# Altium footprint library Footprint_Vlad.PcbLib: 392 footprints (part 18 of 25)
Each footprint in its own frame and in the unit in brackets; x right, y up, seen from the top. Pads: shape width x height; smd on the part's side, far side on the other; paste and mask are expansions set on the pad; w line width, h text height; cw(c..) or ccw(c..) is an arc to the next point about the centre after c.
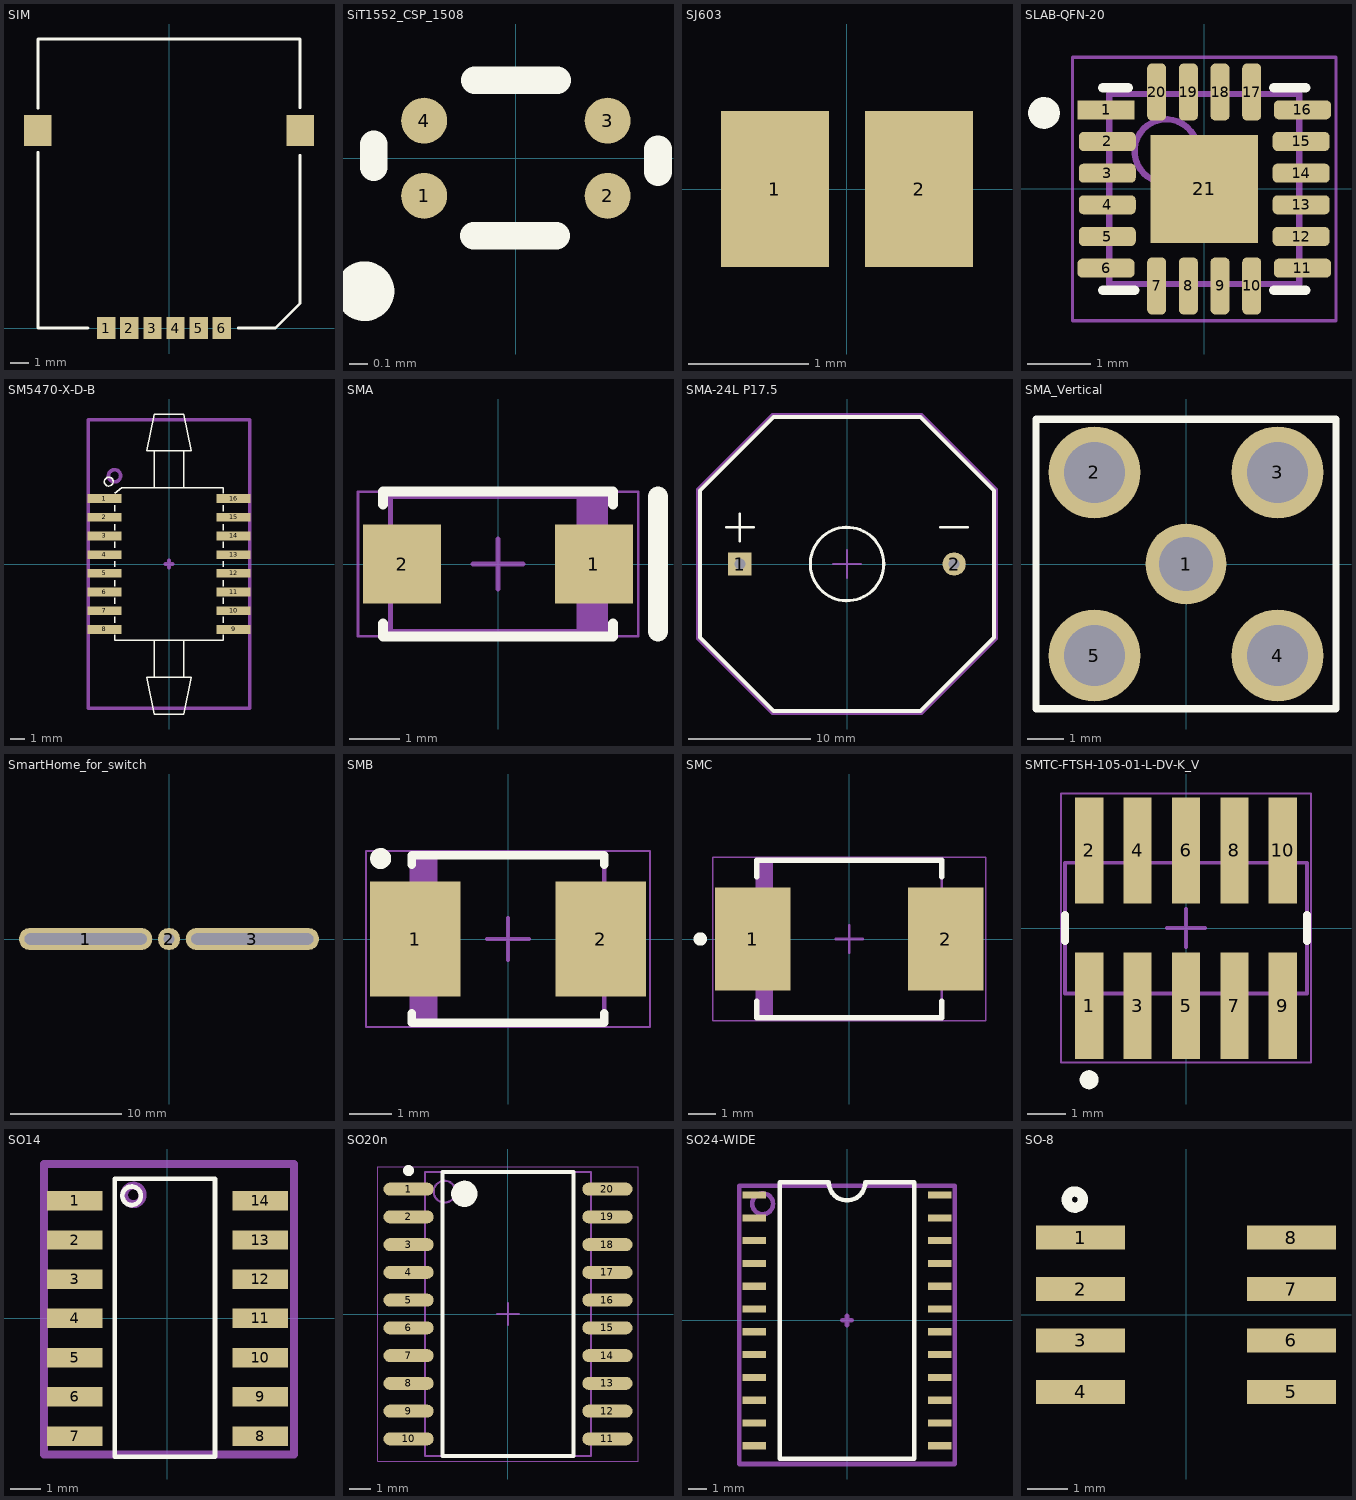
[diagram p17: the footprints below, top view; thin cyan lines are the x and y axes]

## SIM [mm]
pads (8):
  rect 1x1.2 smd: 1(-3.45,0) 2(-2.18,0) 3(-0.91,0) 4(0.36,0) 5(1.63,0) 6(2.9,0)
  rect 1.5x1.7 smd: ""(-7.2,10.85) ""(7.2,10.85)
Top Overlay:
  lines w0.15: -7.2,9.652 -7.2,0 -4.445,0 ; -7.2,12.065 -7.2,15.875 7.2,15.875 7.2,12.104 ; 3.81,0 5.842,0 7.2,1.358 7.2,9.486
3D body: height 2, standoff 0, extent -7.239,0 7.493,16.129

## SiT1552_CSP_1508 [mm]
pads (4):
  round 0.25 smd mask+0.05: 1(-0.5,-0.205) 2(0.5,-0.205) 3(0.5,0.205) 4(-0.5,0.205)
Top Overlay:
  circle w0.254: c-0.825,-0.725 r0.035
  lines w0.15: -0.775,-0.05 -0.775,0.075 ; -0.23,-0.422 0.22,-0.422 ; -0.225,0.425 0.225,0.425 ; 0.775,-0.075 0.775,0.05
3D body "CSP_1508_4pins.stp": height 0.5, standoff -0.07, extent -0.77,-0.42 0.77,0.42

## SJ603 [mm]
pads (2):
  rect 0.9x1.3 smd: 1(-0.6,0) 2(0.6,0)

## SLAB-QFN-20 [mm] "QFN, 20-Leads, Body 3x3mm, Pitch 0.5mm, Thermal Pad 1.7x1.7mm"
height 0.9
pads (21):
  rect 0.9x0.3 smd: 1(-1.55,1.25)
  rrect50% 0.9x0.3 smd: 2(-1.53,0.75) 3(-1.53,0.25) 4(-1.53,-0.25) 5(-1.53,-0.75) 6(-1.55,-1.25) 11(1.55,-1.25) 12(1.53,-0.75) 13(1.53,-0.25) 14(1.53,0.25) 15(1.53,0.75) 16(1.55,1.25)
  rrect50% 0.3x0.9 smd: 7(-0.75,-1.53) 8(-0.25,-1.53) 9(0.25,-1.53) 10(0.75,-1.53) 17(0.75,1.53) 18(0.25,1.53) 19(-0.25,1.53) 20(-0.75,1.53)
  rect 1.7x1.7 smd: 21(0,0)
Top Overlay:
  circle w0.25: c-2.53,1.2 r0.125
  lines w0.15: -1.6,-1.6 -1.1,-1.6 ; -1.6,1.6 -1.2,1.6 ; 1.1,-1.6 1.6,-1.6 ; 1.1,1.6 1.6,1.6
Mechanical 13:
  circle w0.1: c-0.6,0.6 r0.5
  lines w0.1: -1.5,-1.5 -1.5,1.5 1.5,1.5 1.5,-1.5 -1.5,-1.5
Mechanical 15:
  lines w0.05: -2.08,-2.08 -2.08,2.08 2.08,2.08 2.08,-2.08 -2.08,-2.08
  lines w0.1: -0.5,0 0.5,0 ; 0,-0.5 0,0.5
3D body: height 0.9, standoff 0, extent -1.5,-1.5 1.5,1.5

## SM5470-X-D-B [mm]
pads (16):
  rect 2.3x0.6 smd: 1(-4.388,4.445) 2(-4.388,3.175) 3(-4.388,1.905) 4(-4.388,0.635) 5(-4.388,-0.635) 6(-4.388,-1.905) 7(-4.388,-3.175) 8(-4.388,-4.445) 9(4.388,-4.445) 10(4.388,-3.175) 11(4.388,-1.905) 12(4.388,-0.635) 13(4.388,0.635) 14(4.388,1.905) 15(4.388,3.175) 16(4.388,4.445)
Top Overlay:
  circle w0.1: c-4.1,5.6 r0.3
  lines w0.1: -3.7,-4.8 -3.7,-5.2 3.7,-5.2 3.7,-4.8 ; -3.7,-4 -3.7,-3.6 ; -3.7,-2.7 -3.7,-2.3 ; -3.7,-1.5 -3.7,-1.1 ; -3.7,-0.2 -3.7,0.2 ; -3.7,1.1 -3.7,1.5 ; -3.7,2.3 -3.7,2.7 ; -3.7,3.6 -3.7,4 ; -3.7,4.8 -3.2,5.2 3.7,5.2 3.7,4.8 ; -1,-7.7 -1,-5.2 ; -1,5.2 -1,7.7 ; 1,-7.7 1,-5.2 ; 1,5.2 1,7.7 ; 3.7,-4 3.7,-3.6 ; 3.7,-2.7 3.7,-2.3 ; 3.7,-1.5 3.7,-1.1 ; 3.7,-0.2 3.7,0.2 ; 3.7,1.1 3.7,1.5 ; 3.7,2.3 3.7,2.7 ; 3.7,3.6 3.7,4 ; -1.5,-7.7 1.5,-7.7 1,-10.2 -1,-10.2 -1.5,-7.7 ; -1.5,7.7 -1,10.2 1,10.2 1.5,7.7 -1.5,7.7
Mechanical 15:
  circle w0.254: c-3.7,6 r0.412
  lines w0.254: -0.254,0 0.254,0 ; 0,-0.254 0,0.254 ; -5.5,-9.8 5.5,-9.8 5.5,9.8 -5.5,9.8 -5.5,-9.8
  text "0,0" at 0.254,0 h1.52
  text ".Designator" at -2.9,10.7 h1.52
3D body "SM5470-001-D-B.STEP": height 5.54, standoff -0.13, extent -5.138,-9.805 5.162,9.795

## SMA [mm] "Molded Diode, 2-Leads, Body 4.292x2.693mm"
height 2.44
pads (2):
  rect 1.555x1.57 smd: 1(1.915,0) 2(-1.915,0)
Top Overlay:
  lines w0.2: -2.298,-1.185 -2.298,-1.448 2.298,-1.448 2.298,-1.185 ; -2.298,1.185 -2.298,1.448 2.298,1.448 2.298,1.185
  lines w0.4: 3.193,-1.346 3.193,1.346
Mechanical 13:
  region: 2.146,1.346 1.569,1.346 1.569,-1.346 2.146,-1.346
  lines w0.1: -2.146,-1.346 2.146,-1.346 2.146,1.346 -2.146,1.346 -2.146,-1.346
Mechanical 15:
  lines w0.05: -2.795,-1.446 2.795,-1.446 2.795,1.446 -2.795,1.446 -2.795,-1.446
  lines w0.1: -0.5,0 0.5,0 ; 0,-0.5 0,0.5
3D body: height 2.44, standoff 0, extent -2.146,-1.346 2.146,1.346

## SMA-24L P17.5 [mm]
pads (2):
  rect 1.9x1.9 hole 0.9: 1(-8.75,0)
  round 1.9 hole 0.9: 2(8.75,0)
Top Overlay:
  circle w0.254: c0,0 r3
  lines w0.2: -9.875,3 -7.625,3 ; -8.75,1.875 -8.75,4.125 ; 7.625,3 9.875,3
  lines w0.3: -12,-6 -12,6 -6,12 6,12 12,6 12,-6 6,-12 -6,-12 -12,-6
Courtyard Top:
  lines w0.2: -12.25,-6.1 -6.1,-12.25 6.1,-12.25 12.25,-6.1 12.25,6.1 6.1,12.25 -6.1,12.25 -12.25,6.1 -12.25,-6.1
Top Component Center:
  lines w0.2: -1.125,0 1.125,0 ; 0,-1.125 0,1.125
3D body "Sonitron-SMA(T)-24 P17_5.STEP": height 15.51, standoff -5.5, extent -12,-12 12,12

## SMA_Vertical [mm] "SMA PCB THT Jack"
height 10.46
pads (5):
  round 2.25 hole 1.5: 1(0,0)
  round 2.55 hole 1.7: 2(-2.54,2.54) 3(2.54,2.54) 4(2.54,-2.54) 5(-2.54,-2.54)
Top Overlay:
  lines w0.2: -4.16,-4.015 -4.16,4.015 4.16,4.015 4.16,-4.015 -4.16,-4.015
Assembly Top:
  lines w0.1: -4.16,-4.015 4.16,-4.015 4.16,4.015 -4.16,4.015 -4.16,-4.015
Courtyard Top:
  lines w0.05: -0.5,0 0.5,0 ; 0,-0.5 0,0.5 ; -4.16,-4.015 -4.16,4.015 4.16,4.015 4.16,-4.015 -4.16,-4.015
3D body "5-1814832-1.stp": height 9.5, standoff -4, extent -3.2,-3.2 3.2,3.2

## SmartHome_for_switch [mm]
pads (3):
  oval 12x2 hole 1 slot 11 at 0 deg: 1(-7.5,0) 3(7.5,0)
  round 2 hole 1: 2(0,0)

## SMB [mm] "Molded Diode, 2-Leads, Body 4.292x2.693mm"
height 2.44
pads (2):
  rect 2.159x2.743 smd: 1(-2.21,0) 2(2.21,0)
Top Overlay:
  circle w0.25: c-3.04,1.921 r0.125
  lines w0.2: -2.3,-1.772 -2.3,-2 2.3,-2 2.3,-1.772 ; -2.3,1.772 -2.3,2 2.3,2 2.3,1.772
Mechanical 13:
  rectangle: -2.3,-1.975 -1.681,1.975
  lines w0.1: -2.3,-1.975 -2.3,1.975 2.3,1.975 2.3,-1.975 -2.3,-1.975
Mechanical 15:
  lines w0.05: -3.39,-2.1 -3.39,2.1 3.39,2.1 3.39,-2.1 -3.39,-2.1
  lines w0.1: -0.5,0 0.5,0 ; 0,-0.5 0,0.5
3D body: height 2.42, standoff 0, extent -2.3,-1.975 2.3,1.975

## SMC [mil] "Molded, 2-Leads, Body 6.86x5.84mm"
height 99.02
pads (2):
  rect 110x150 smd: 1(-140.49,0) 2(140.49,0)
Top Overlay:
  circle w9.84: c-217.15,0 r4.92
  lines w7.87: -135.04,-90.75 -135.04,-114.96 135.04,-114.96 135.04,-90.75 ; -135.04,90.75 -135.04,114.96 135.04,114.96 135.04,90.75
Mechanical 13:
  rectangle: -135.45,-114.96 -111.25,114.96
  lines w3.94: -135.04,-114.96 -135.04,114.96 135.04,114.96 135.04,-114.96 -135.04,-114.96
Mechanical 15:
  lines w1.97: -199.43,-118.9 -199.43,118.9 199.43,118.9 199.43,-118.9 -199.43,-118.9
  lines w3.94: -19.68,0 19.69,0 ; 0,-19.68 0,19.68
3D body: height 99.02, standoff 1.97, extent -135.04,-114.96 135.04,114.96

## SMTC-FTSH-105-01-L-DV-K_V [mm] "CONN, 10-Leads, Body 6.35x3.43mm, Pitch 1.27mm"
height 6.25
pads (10):
  rect 0.74x2.79 smd: 1(-2.54,-2.035) 2(-2.54,2.035) 3(-1.27,-2.035) 4(-1.27,2.035) 5(0,-2.035) 6(0,2.035) 7(1.27,-2.035) 8(1.27,2.035) 9(2.54,-2.035) 10(2.54,2.035)
Top Overlay:
  circle w0.25: c-2.54,-3.98 r0.125
  lines w0.2: -3.175,-0.341 -3.175,0.341 ; 3.175,-0.341 3.175,0.341
Mechanical 13:
  lines w0.1: -3.175,-1.715 -3.175,1.715 3.175,1.715 3.175,-1.715 -3.175,-1.715
Mechanical 15:
  lines w0.05: -3.275,-3.53 -3.275,3.53 3.275,3.53 3.275,-3.53 -3.275,-3.53
  lines w0.1: -0.5,0 0.5,0 ; 0,-0.5 0,0.5
3D body "FTSH-105-01-L-DV-K.stp": height 6.12, standoff 0, extent -3.175,-2.921 3.175,2.921

## SO14 [mm]
pads (14):
  rect 1.8x0.63 smd: 1(-3,3.81) 2(-3,2.54) 3(-3,1.27) 4(-3,0) 5(-3,-1.27) 6(-3,-2.54) 7(-3,-3.81) 8(3,-3.81) 9(3,-2.54) 10(3,-1.27) 11(3,0) 12(3,1.27) 13(3,2.54) 14(3,3.81)
Top Overlay:
  circle w0.15: c-1.16,3.97 r0.3
  lines w0.15: -1.71,-4.48 1.54,-4.48 1.54,4.52 -1.71,4.52 -1.71,-4.48
Mechanical 15:
  circle w0.254: c-1.1,4 r0.3
  lines w0.254: -4,-4.4 -4,5 4.1,5 4.1,-4.4 -4,-4.4 ; -4,-4.4 -4,-4.4
  text ".Designator" at -3.2,5.5 h1.52

## SO20n [mm] "SOIC, 20-Leads, Body 12.8x7.5mm, Pitch 1.27mm, IPC Medium Density"
height 2.65
pads (20):
  oval 2.3x0.6 smd: 1(-4.55,5.715) 2(-4.55,4.445) 3(-4.55,3.175) 4(-4.55,1.905) 5(-4.55,0.635) 6(-4.55,-0.635) 7(-4.55,-1.905) 8(-4.55,-3.175) 9(-4.55,-4.445) 10(-4.55,-5.715) 11(4.55,-5.715) 12(4.55,-4.445) 13(4.55,-3.175) 14(4.55,-1.905) 15(4.55,-0.635) 16(4.55,0.635) 17(4.55,1.905) 18(4.55,3.175) 19(4.55,4.445) 20(4.55,5.715)
Top Overlay:
  circle w0.6: c-2,5.5 r0.3
  circle w0.25: c-4.55,6.565 r0.125
  lines w0.2: -3,-6.5 3,-6.5 3,6.5 -3,6.5 -3,-6.5
Mechanical 13:
  circle w0.1: c-2.9,5.6 r0.5
  lines w0.1: -3.8,-6.5 3.8,-6.5 3.8,6.5 -3.8,6.5 -3.8,-6.5
Mechanical 15:
  lines w0.05: -5.95,-6.75 5.95,-6.75 5.95,6.75 -5.95,6.75 -5.95,-6.75
  lines w0.1: -0.5,0 0.5,0 ; 0,-0.5 0,0.5
3D body: height 2.65, standoff 0.1, extent -3.8,-6.5 3.8,6.5

## SO24-WIDE [mm]
pads (24):
  rect 1.3x0.4 smd: 1(-5.162,6.985) 2(-5.162,5.715) 3(-5.162,4.445) 4(-5.162,3.175) 5(-5.162,1.905) 6(-5.162,0.635) 7(-5.162,-0.635) 8(-5.162,-1.905) 9(-5.162,-3.175) 10(-5.162,-4.445) 11(-5.162,-5.715) 12(-5.162,-6.985) 13(5.163,-6.985) 14(5.163,-5.715) 15(5.163,-4.445) 16(5.163,-3.175) 17(5.163,-1.905) 18(5.163,-0.635) 19(5.163,0.635) 20(5.163,1.905) 21(5.163,3.175) 22(5.163,4.445) 23(5.163,5.715) 24(5.163,6.985)
Top Overlay:
  lines w0.254: -3.75,-7.7 3.75,-7.7 3.75,7.7 1.016,7.7 cw(c0,7.7) -1.016,7.7 -3.75,7.7 -3.75,-7.7
Mechanical 15:
  circle w0.254: c-4.7,6.5 r0.583
  lines w0.254: -0.254,0 0.254,0 ; 0,-0.254 0,0.254 ; -6,-8 6,-8 6,7.5 -6,7.5 -6,-8
  text ".Designator" at -2.9,8.3 h1.52
3D body "User Library-SO-24W.STEP": height 2.48, standoff 0, extent -5.117,-7.72 5.193,7.69

## SO-8 [mm]
pads (8):
  rect 2.2x0.6 smd: 1(-2.6,1.905) 2(-2.6,0.635) 3(-2.6,-0.635) 4(-2.6,-1.905) 5(2.6,-1.905) 6(2.6,-0.635) 7(2.6,0.635) 8(2.6,1.905)
Top Overlay:
  circle w0.254: c-2.743,2.842 r0.2
Mechanical 15:
  circle w0.254: c-2.7,1.9 r0.1
  text ".Designator" at -3,3 h1.52
3D body "User Library-SOIC-8-1.step": height 1.75, standoff 0, extent -3,-2.45 3,2.45